# Altium schematic symbol library ReguladoresTransistores.SchLib: 5 symbols
Pins are listed as number, name and electrical type; pins without a type are passive.

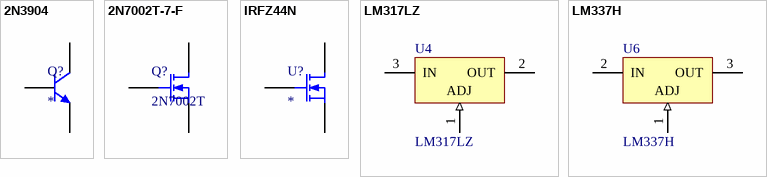
[diagram p0: symbols 2N3904 to LM337H]

## 2N3904
designator Q?
NPN General Purpose Amplifier
footprint TO92_1
pins: 1 E, 2 B, 3 C

## 2N7002T-7-F
designator Q?, comment 2N7002T
footprint SOT523 (3 Lead SC75; EIAJ-SC75; SOT523; SOT416?)
pins: 1 G, 2 S, 3 D

## IRFZ44N
designator U?
footprint TO-220V
pins: 1 G, 2 D, 3 S

## LM317LZ
designator U4
1.2V to 37V Voltage Regulator; Published: 24-Aug-2001; LatestRevisionDate: 17-Jul-2002; LatestRevisionNote: Re-released for DXP Platform.; DatasheetVersion: Apr-1994; PackageReference: TO92-132; Publisher: Altium Limited; PackageDescription: TO, Flat Index; 3 In-Line, Axial Leads; Body Dia. 4.8mm; Leads 0.51 x 0.51 mm (max); ComponentLink1Description: Manufacturer Link; ComponentLink1URL: http://www.st.com/; ComponentLink2Description: Datasheet; ComponentLink2URL: http://www.st.com/stonline/products/literature/ds/2168/lm217l.pdf
footprint TO-92B_2 (LM317)
footprint TO-220V
pins: 1 ADJ (in), 2 OUT (power), 3 IN (power)

## LM337H
designator U6
Adjustable Negative Voltage Regulator; Published: 24-Aug-2001; LatestRevisionDate: 17-Jul-2002; LatestRevisionNote: Re-released for DXP Platform.; DatasheetVersion: Mar-1993; PackageReference: TO-39; Publisher: Altium Limited; PackageDescription: Can; 3 Leads; Pin Circle Dia. 5.08 mm; Lead Dia. 0.49 mm (max); ComponentLink1Description: Manufacturer Link; ComponentLink1URL: http://www.st.com/; ComponentLink2Description: Datasheet; ComponentLink2URL: http://www.st.com/stonline/products/literature/ds/2167/lm137.pdf
footprint TO-220V
pins: 1 ADJ (in), 2 IN (power), 3 OUT (power)